# Altium footprint library CustomCase.PcbLib: 411 footprints (part 20 of 26)
Each footprint in its own frame and in the unit in brackets; x right, y up, seen from the top. Pads: shape width x height; smd on the part's side, far side on the other; paste and mask are expansions set on the pad; w line width, h text height; cw(c..) or ccw(c..) is an arc to the next point about the centre after c.
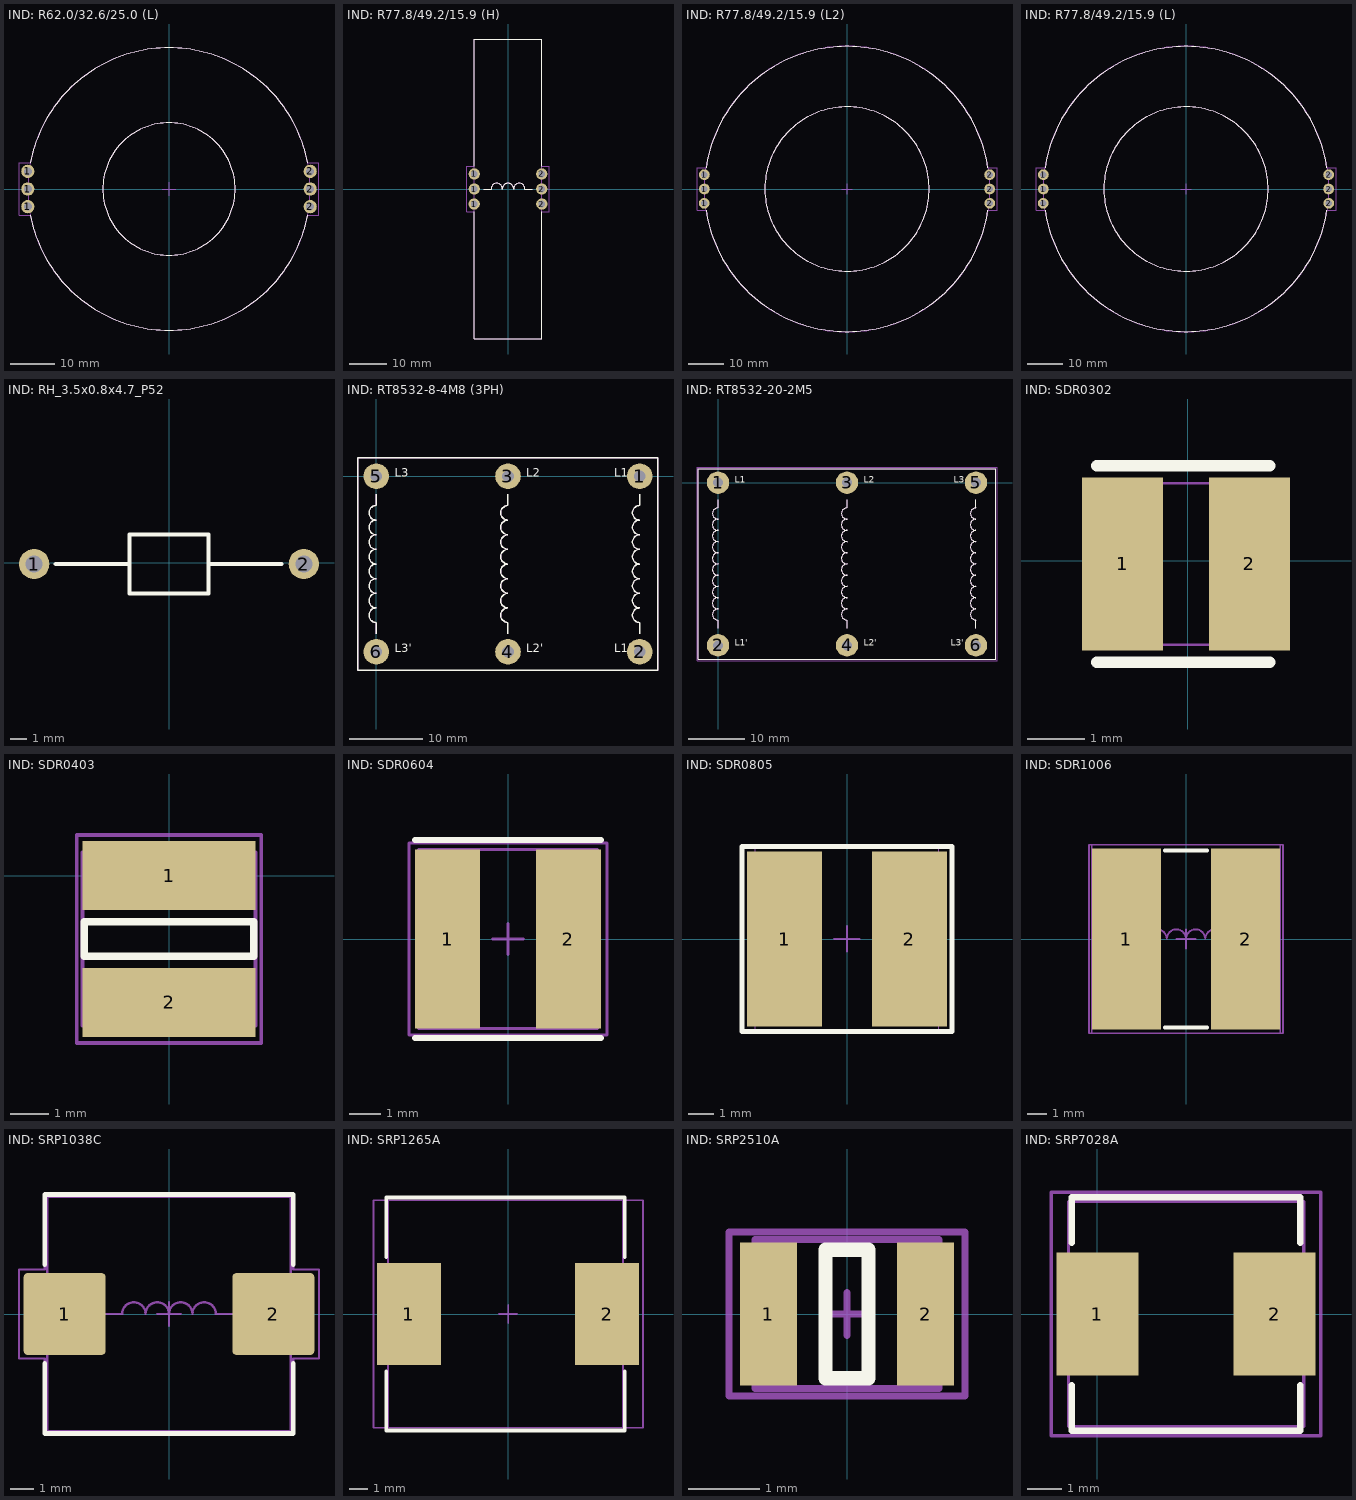
[diagram p19: the footprints below, top view; thin cyan lines are the x and y axes]

## IND: R62.0/32.6/25.0 (L) [mm]
pads (6):
  round 3 hole 1.8: 1(-32,-4) 1(-32,0) 1(-32,4) 2(32,-4) 2(32,0) 2(32,4)
Top Overlay:
  circle w0.2: c0,0 r15
  lines w0.2: -31.435,-5.988 ccw(c0,0) 31.435,-5.988 ; -31.435,5.988 cw(c0,0) 31.435,5.988
Top Assy:
  circle w0.1: c0,0 r32
  circle w0.1: c0,0 r15
Size Area:
  lines w0.1: -1.5,0 1.5,0 ; 0,-1.5 0,1.5 ; -34,-6 -34,5.988 -31.435,5.988 cw(c0,0) 31.435,5.988 34,5.988 34,-6 31.435,-5.988 cw(c0,0) -31.435,-5.988 -34,-6
3D body "F7 R 62.0 x 32.6 x 25.0 v1.step": height 27.03, standoff -0.03, extent -32.022,-32.016 32.022,32.016

## IND: R77.8/49.2/15.9 (H) [mm]
pads (6):
  round 3 hole 1.8: 1(-9,-4) 1(-8.976,0) 1(-8.976,4) 2(8.976,0) 2(8.976,4) 2(9,-4)
Top Overlay:
  lines w0.2: -8.976,-6 -8.976,-39.926 8.976,-39.926 8.976,-6 ; -8.976,6 -8.976,39.926 8.976,39.926 8.976,6 ; -6.5,0 -4.5,0 cw(c-3,0) -1.5,0 cw(c0,0) 1.5,0 cw(c3,0) 4.5,0 6.5,0
Top Assy:
  lines w0.1: -6.5,0 -4.5,0 cw(c-3,0) -1.5,0 cw(c0,0) 1.5,0 cw(c3,0) 4.5,0 6.5,0 ; -8.976,-39.926 8.976,-39.926 8.976,39.926 -8.976,39.926 -8.976,-39.926
Size Area:
  lines w0.1: -11,-6 -8.976,-6 -8.976,-39.926 8.976,-39.926 8.976,-6 11,-6 11,6 8.976,6 8.976,39.926 -8.976,39.926 -8.976,6 -11,6 -11,-6
3D body "F8 R 77.8 x 49.2 x 15.9 v1.step": height 79.93, standoff 0.07, extent -8.976,-39.926 8.976,39.926

## IND: R77.8/49.2/15.9 (L2) [mm]
pads (6):
  round 3 hole 1.8: 1(-40,-4) 1(-39.926,0) 1(-39.926,4) 2(39.926,0) 2(39.926,4) 2(40,-4)
Top Overlay:
  circle w0.2: c0,0 r23
  lines w0.2: -39.473,-5.996 ccw(c0,0) 39.473,-5.996 ; -39.473,5.996 cw(c0,0) 39.473,5.996
3D model:
  circle w0.1: c0,0 r23
  circle w0.1: c0,0 r40
Size Area:
  lines w0.1: -1.5,0 1.5,0 ; 0,-1.5 0,1.5 ; -42,-6 -42,5.996 -39.473,5.996 cw(c0,0) 39.473,5.996 39.5,5.996 42,5.996 42,-5.996 39.473,-5.996 cw(c0,0) -39.473,-5.996 -42,-6
3D body "F8 R 77.8 x 49.2 x 15.9 v3.step": height 34.23, standoff 0.27, extent -39.911,-40.026 39.926,39.826

## IND: R77.8/49.2/15.9 (L) [mm]
pads (6):
  round 3 hole 1.8: 1(-40,-4) 1(-39.926,0) 1(-39.926,4) 2(39.926,0) 2(39.926,4) 2(40,-4)
Top Overlay:
  circle w0.2: c0,0 r23
  lines w0.2: -39.473,-5.996 ccw(c0,0) 39.473,-5.996 ; -39.473,5.996 cw(c0,0) 39.473,5.996
3D model:
  circle w0.1: c0,0 r23
  circle w0.1: c0,0 r40
Size Area:
  lines w0.1: -1.5,0 1.5,0 ; 0,-1.5 0,1.5 ; -42,-6 -42,5.996 -39.473,5.996 cw(c0,0) 39.473,5.996 39.5,5.996 42,5.996 42,-5.996 39.473,-5.996 cw(c0,0) -39.473,-5.996 -42,-6
3D body "F8 R 77.8 x 49.2 x 15.9 v1.step": height 17.73, standoff -0.23, extent -39.926,-39.926 39.926,39.926

## IND: RH_3.5x0.8x4.7_P52 [mm]
pads (2):
  round 1.8 hole 1: 1(-8.004,-0.075) 2(7.996,-0.075)
Top Overlay:
  lines w0.254: -6.729,-0.075 -2.354,-0.075 ; 2.346,-0.075 6.671,-0.075 ; -2.354,-1.825 2.346,-1.825 2.346,1.675 -2.354,1.675 -2.354,-1.825
3D body "Pin_0.8_6x6.STEP": height 2.4, standoff -4, extent -8.404,-0.475 -2.004,0.325
3D body "Pin_0.8_6x6.STEP": height 2.4, standoff -4, extent 1.996,-0.475 8.396,0.325
3D body: height 3.55, standoff 0.05, extent -2.354,-1.825 2.346,1.675

## IND: RT8532-8-4M8 (3PH) [mm]
pads (6):
  round 3.5 hole 1.6: 1(36,0) 2(36,-24) 3(18,0) 4(18,-24) 5(0,0) 6(0,-24)
Top Overlay:
  lines w0.2: 0,-21.5 0,-20 cw(c0,-19) 0,-18 cw(c0,-17) 0,-16 cw(c0,-15) 0,-14 cw(c0,-13) 0,-12 cw(c0,-11) 0,-10 cw(c0,-9) 0,-8 cw(c0,-7) 0,-6 cw(c0,-5) 0,-4 0,-2.5 ; 18,-21.5 18,-20 cw(c18,-19) 18,-18 cw(c18,-17) 18,-16 cw(c18,-15) 18,-14 cw(c18,-13) 18,-12 cw(c18,-11) 18,-10 cw(c18,-9) 18,-8 cw(c18,-7) 18,-6 cw(c18,-5) 18,-4 18,-2.5 ; 36,-21.5 36,-20 cw(c36,-19) 36,-18 cw(c36,-17) 36,-16 cw(c36,-15) 36,-14 cw(c36,-13) 36,-12 cw(c36,-11) 36,-10 cw(c36,-9) 36,-8 cw(c36,-7) 36,-6 cw(c36,-5) 36,-4 36,-2.5 ; -2.5,-26.5 38.5,-26.5 38.5,2.5 -2.5,2.5 -2.5,-26.5
  text "L1'" at 32.5,-24.5 h2
  text "L1" at 32.5,-0.5 h2
  text "L2'" at 20.5,-24.5 h2
  text "L2" at 20.5,-0.5 h2
  text "L3'" at 2.5,-24.5 h2
  text "L3" at 2.5,-0.5 h2
Top Assy:
  lines w0.1: 0,-21.5 0,-20 cw(c0,-19) 0,-18 cw(c0,-17) 0,-16 cw(c0,-15) 0,-14 cw(c0,-13) 0,-12 cw(c0,-11) 0,-10 cw(c0,-9) 0,-8 cw(c0,-7) 0,-6 cw(c0,-5) 0,-4 0,-2.5 ; 18,-21.5 18,-20 cw(c18,-19) 18,-18 cw(c18,-17) 18,-16 cw(c18,-15) 18,-14 cw(c18,-13) 18,-12 cw(c18,-11) 18,-10 cw(c18,-9) 18,-8 cw(c18,-7) 18,-6 cw(c18,-5) 18,-4 18,-2.5 ; 36,-21.5 36,-20 cw(c36,-19) 36,-18 cw(c36,-17) 36,-16 cw(c36,-15) 36,-14 cw(c36,-13) 36,-12 cw(c36,-11) 36,-10 cw(c36,-9) 36,-8 cw(c36,-7) 36,-6 cw(c36,-5) 36,-4 36,-2.5 ; -2.5,-26.5 38.5,-26.5 38.5,2.5 -2.5,2.5 -2.5,-26.5
  text "L3'" at 2.5,-24.5 h2
  text "L3" at 2.5,-0.5 h2
  text "L2'" at 20.5,-24.5 h2
  text "L2" at 20.5,-0.5 h2
  text "L1'" at 32.5,-24.5 h2
  text "L1" at 32.5,-0.5 h2
Size Area:
  lines w0.1: -2.5,-26.5 38.5,-26.5 38.5,2.5 -2.5,2.5 -2.5,-26.5
3D body "RT8532-8-4M8.STEP": height 43.97, standoff -4, extent -2.5,-26.5 38.5,2.5

## IND: RT8532-20-2M5 [mm]
pads (6):
  round 4 hole 1.8: 1(0,0) 2(0,-29) 3(23,0) 4(23,-29) 5(46,0) 6(46,-29)
Top Overlay:
  lines w0.2: 0,-26 0,-24.5 cw(c0,-23.5) 0,-22.5 cw(c0,-21.5) 0,-20.5 cw(c0,-19.5) 0,-18.5 cw(c0,-17.5) 0,-16.5 cw(c0,-15.5) 0,-14.5 cw(c0,-13.5) 0,-12.5 cw(c0,-11.5) 0,-10.5 cw(c0,-9.5) 0,-8.5 cw(c0,-7.5) 0,-6.5 cw(c0,-5.5) 0,-4.5 0,-3 ; 23,-26 23,-24.5 cw(c23,-23.5) 23,-22.5 cw(c23,-21.5) 23,-20.5 cw(c23,-19.5) 23,-18.5 cw(c23,-17.5) 23,-16.5 cw(c23,-15.5) 23,-14.5 cw(c23,-13.5) 23,-12.5 cw(c23,-11.5) 23,-10.5 cw(c23,-9.5) 23,-8.5 cw(c23,-7.5) 23,-6.5 cw(c23,-5.5) 23,-4.5 23,-3 ; 46,-26 46,-24.5 cw(c46,-23.5) 46,-22.5 cw(c46,-21.5) 46,-20.5 cw(c46,-19.5) 46,-18.5 cw(c46,-17.5) 46,-16.5 cw(c46,-15.5) 46,-14.5 cw(c46,-13.5) 46,-12.5 cw(c46,-11.5) 46,-10.5 cw(c46,-9.5) 46,-8.5 cw(c46,-7.5) 46,-6.5 cw(c46,-5.5) 46,-4.5 46,-3 ; -3.5,-31.5 49.5,-31.5 49.5,2.5 -3.5,2.5 -3.5,-31.5
  text "L2" at 26,-0.5 h2
  text "L2'" at 26,-29.5 h2
  text "L3" at 42,-0.5 h2
  text "L1" at 3,-0.5 h2
  text "L3'" at 41.5,-29.5 h2
  text "L1'" at 3,-29.5 h2
Top Assy:
  lines w0.1: 0,-26 0,-24.5 cw(c0,-23.5) 0,-22.5 cw(c0,-21.5) 0,-20.5 cw(c0,-19.5) 0,-18.5 cw(c0,-17.5) 0,-16.5 cw(c0,-15.5) 0,-14.5 cw(c0,-13.5) 0,-12.5 cw(c0,-11.5) 0,-10.5 cw(c0,-9.5) 0,-8.5 cw(c0,-7.5) 0,-6.5 cw(c0,-5.5) 0,-4.5 0,-3 ; 23,-26 23,-24.5 cw(c23,-23.5) 23,-22.5 cw(c23,-21.5) 23,-20.5 cw(c23,-19.5) 23,-18.5 cw(c23,-17.5) 23,-16.5 cw(c23,-15.5) 23,-14.5 cw(c23,-13.5) 23,-12.5 cw(c23,-11.5) 23,-10.5 cw(c23,-9.5) 23,-8.5 cw(c23,-7.5) 23,-6.5 cw(c23,-5.5) 23,-4.5 23,-3 ; 46,-26 46,-24.5 cw(c46,-23.5) 46,-22.5 cw(c46,-21.5) 46,-20.5 cw(c46,-19.5) 46,-18.5 cw(c46,-17.5) 46,-16.5 cw(c46,-15.5) 46,-14.5 cw(c46,-13.5) 46,-12.5 cw(c46,-11.5) 46,-10.5 cw(c46,-9.5) 46,-8.5 cw(c46,-7.5) 46,-6.5 cw(c46,-5.5) 46,-4.5 46,-3 ; -3.5,-31.5 -3.5,2 -3.5,2.5 49.5,2.5 49.5,-31.5 -3.5,-31.5
  text "L1" at 3,-0.5 h2
  text "L1'" at 3,-29.5 h2
  text "L2" at 26,-0.5 h2
  text "L2'" at 26,-29.5 h2
  text "L3" at 42,-0.5 h2
  text "L3'" at 41.5,-29.5 h2
Size Area:
  lines w0.1: -3.75,-31.75 49.75,-31.75 49.75,2.75 -3.75,2.75 -3.75,-31.75
3D body "RT8532-20-2M5.STEP": height 54.93, standoff -4, extent -3.5,-31.5 49.5,2.5

## IND: SDR0302 [mm]
pads (2):
  rect 1.4x3 smd: 1(-1.131,-0.059) 2(1.069,-0.059)
Top Overlay:
  lines w0.2: -1.581,-1.759 1.419,-1.759 ; -1.581,1.641 1.419,1.641
Size Area:
  region: 0.419,1.341 1.469,1.341 1.469,-1.459 0.419,-1.459
  region: -1.531,1.341 -0.481,1.341 -0.481,-1.459 -1.531,-1.459
  region: -1.441,-1.429 -1.441,-1.454 -1.476,-1.489 -1.526,-1.489 -1.561,-1.454 -1.561,-1.429 -1.561,-1.405 -1.526,-1.37 -1.476,-1.37 -1.441,-1.405
  lines w0.051: -1.531,-1.459 1.469,-1.459 1.469,1.341 -1.531,1.341 -1.531,-1.459
3D body "User Library-CD32 inductor.step": height 2.1, standoff 0, extent -1.676,-1.559 1.626,1.441

## IND: SDR0403 [mm]
pads (2):
  rect 4.5x1.8 smd: 1(0,0) 2(0,-3.3)
Top Overlay:
  lines w0.2: -2.2,-2.1 -2.2,-1.2 2.2,-1.2 2.2,-2.1 -2.2,-2.1
Top Assy:
  lines w0.1: -2.25,-3.9 2.25,-3.9 2.25,0.6 -2.25,0.6 -2.25,0.25 -2.25,-3.9
Size Area:
  lines w0.1: -2.4,-4.35 -2.4,1.05 2.4,1.05 2.4,-4.35 -2.4,-4.35
3D body "User Library-SDR0403.STEP": height 3.5, standoff 0, extent -2.25,-3.9 2.25,0.6

## IND: SDR0604 [mm]
pads (2):
  rect 2.1x5.8 smd: 1(-1.95,0) 2(1.95,0)
Top Overlay:
  lines w0.2: -3,-3.2 3,-3.2 ; -3,3.2 3,3.2
Top Assy:
  lines w0.1: -2.9,-2.9 -2.9,2.9 2.9,2.9 2.9,-2.9 -2.9,-2.9
Size Area:
  lines w0.1: -0.5,0 0.5,0 ; 0,-0.5 0,0.5 ; -3.2,-3.1 -3.2,3.1 3.2,3.1 3.2,-3.1 -3.2,-3.1
3D body "SDR0604.STEP": height 4.8, standoff 0, extent -2.9,-2.9 2.9,2.9

## IND: SDR0805 [mm]
height 5.3
pads (2):
  rect 3x7 smd: 1(-2.5,0) 2(2.5,0)
Top Overlay:
  lines w0.2: -4.2,-3.7 -4.2,3.7 4.2,3.7 4.2,-3.7 -4.2,-3.7
Top Assy:
  lines w0.05: -3.675,-3.75 -3.675,3.75 3.675,3.75 3.675,-3.75 -3.675,-3.75
Size Area:
  lines w0.1: -0.5,0 0.5,0 ; 0,-0.5 0,0.5 ; -4.2,-3.7 4.2,-3.7 4.2,3.725 -4.2,3.725 -4.2,-3.7
3D body "SDR0805.STEP": height 5.08, standoff 0.03, extent -3.677,-3.75 3.677,3.75

## IND: SDR1006 [mm]
pads (2):
  rect 3.6x9.4 smd: 1(-3.1,0) 2(3.1,0)
Top Overlay:
  lines w0.2: -1.1,-4.6 1.1,-4.6 ; -1.1,4.6 1.1,4.6
Top Assy:
  lines w0.1: -4.2,0 -3,0 cw(c-2.5,0) -2,0 cw(c-1.5,0) -1,0 cw(c-0.5,0) 0,0 cw(c0.5,0) 1,0 cw(c1.5,0) 2,0 cw(c2.5,0) 3,0 4.2,0 ; -4.9,-4.9 4.9,-4.9 4.9,4.9 -4.9,4.9 -4.9,-4.9
Size Area:
  lines w0.1: -0.5,0 0.5,0 ; 0,-0.5 0,0.5 ; -5.05,-4.9 -5.05,4.9 5.05,4.9 5.05,-4.9 -5.05,-4.9
3D body "SDR1006.STEP": height 5.8, standoff 0, extent -4.9,-4.9 4.9,4.9

## IND: SRP1038C [mm]
pads (2):
  rrect10% 3.5x3.5 smd mask+0.102: 1(-4.45,0) 2(4.45,0)
Top Overlay:
  lines w0.2: -5.3,-2.1 -5.3,-5.1 5.3,-5.1 5.3,-2.1 ; -5.3,2.1 -5.3,5.1 5.3,5.1 5.3,2.1
Top Assy:
  lines w0.1: -4,0 -2,0 cw(c-1.5,0) -1,0 cw(c-0.5,0) 0,0 cw(c0.5,0) 1,0 cw(c1.5,0) 2,0 4,0 ; -5.2,-5 -5.2,5 5.2,5 5.2,-5 -5.2,-5
Size Area:
  lines w0.1: -0.5,0 0.5,0 ; 0,-0.5 0,0.5 ; -6.4,-1.9 -5.3,-1.9 -5.3,-5.1 5.3,-5.1 5.3,-1.9 6.4,-1.9 6.4,1.9 5.3,1.9 5.3,5.1 -5.3,5.1 -5.3,1.9 -6.4,1.9 -6.4,-1.9
3D body "SRP1038A.STEP": height 3.8, standoff 0.05, extent -5.2,-5 5.2,5

## IND: SRP1265A [mm]
pads (2):
  rect 3.5x5.6 smd: 1(-5.45,0) 2(5.425,0)
Top Overlay:
  lines w0.2: -6.7,-3.15 -6.7,-6.4 6.4,-6.4 6.4,-3.15 ; -6.7,3.125 -6.7,6.4 6.4,6.4 6.4,3.125
Top Assy:
  lines w0.1: -6.6,-6.25 -6.6,6.25 6.3,6.25 6.3,-6.25 -6.6,-6.25
Size Area:
  lines w0.1: -0.5,0 0.5,0 ; 0,-0.5 0,0.5 ; -7.4,-6.25 -7.4,6.25 7.4,6.25 7.4,-6.25 -7.4,-6.25
3D body "SRP1265A series.stp": height 6.31, standoff 0, extent -6.6,-6.25 6.3,6.25

## IND: SRP2510A [mm]
pads (2):
  rect 0.8x2 smd: 1(-1.1,0) 2(1.1,0)
Top Overlay:
  lines w0.2: -0.3,-0.9 0.3,-0.9 0.3,0.9 -0.3,0.9 -0.3,-0.9
Top Assy:
  lines w0.1: -1.285,-1.045 1.285,-1.045 1.285,1.045 -1.285,1.045 -1.285,-1.045
Size Area:
  lines w0.1: -0.3,0 0.3,0 ; 0,-0.3 0,0.3 ; -1.65,-1.15 1.65,-1.15 1.65,1.15 -1.65,1.15 -1.65,-1.15
3D body "666.step": height 0.97, standoff 0.01, extent -1.285,-1.045 1.285,1.045

## IND: SRP7028A [mm]
pads (2):
  rect 2.4x3.6 smd: 1(0,0) 2(5.2,0)
Top Overlay:
  lines w0.2: -0.75,-2.1 -0.75,-3.425 5.95,-3.425 5.95,-2.1 ; -0.75,2.1 -0.75,3.425 5.95,3.425 5.95,2.1
Top Assy:
  lines w0.1: -0.847,-3.301 6.053,-3.301 6.053,3.299 -0.847,3.299 -0.847,-3.301
Size Area:
  lines w0.1: -1.35,-3.575 -1.35,3.575 6.55,3.575 6.55,-3.575 -1.35,-3.575
3D body "SRP 7028A series.STEP": height 2.83, standoff 0, extent -0.847,-3.301 6.053,3.299